# Altium footprint library 20Cnts-D.PcbLib: 1 footprints
Each footprint in its own frame and in the unit in brackets; x right, y up, seen from the top. Pads: shape width x height; smd on the part's side, far side on the other; paste and mask are expansions set on the pad; w line width, h text height; cw(c..) or ccw(c..) is an arc to the next point about the centre after c.
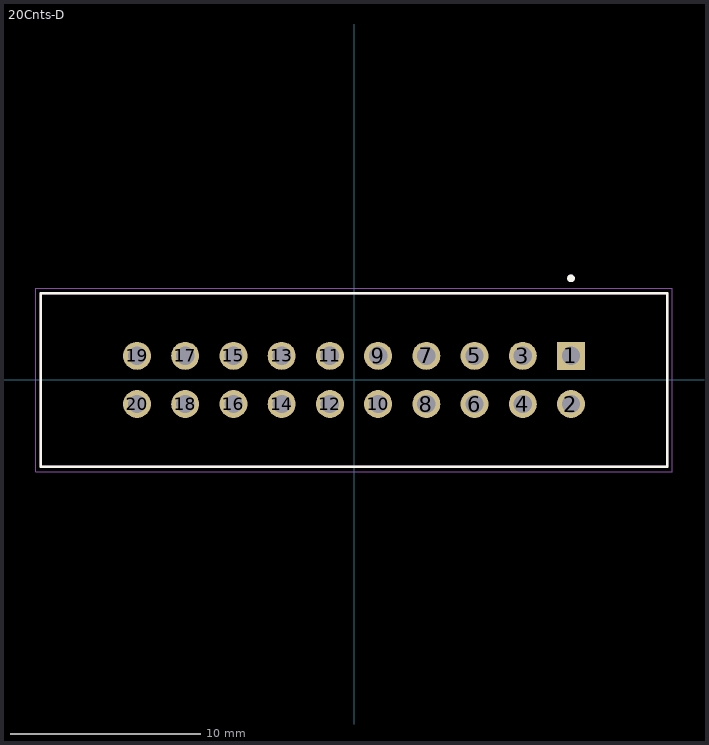
[diagram p0: the footprint, top view; thin cyan lines are the x and y axes]

## 20Cnts-D [mil]
pads (20):
  rect 58x58 hole 38: 1(450,50)
  round 58 hole 38: 2(450,-50) 3(350,50) 4(350,-50) 5(250,50) 6(250,-50) 7(150,50) 8(150,-50) 9(50,50) 10(50,-50) 11(-50,50) 12(-50,-50) 13(-150,50) 14(-150,-50) 15(-250,50) 16(-250,-50) 17(-350,50) 18(-350,-50) 19(-450,50) 20(-450,-50)
Top Overlay:
  circle w7.87: c450,210.63 r3.94
  lines w5: -650,-180 650,-180 650,180 -650,180 -650,-180
Mechanical 13:
  circle w7.87: c450,210.63 r3.94
  lines w5: -650,-180 650,-180 650,180 -650,180 -650,-180
Mechanical 15:
  lines w1.97: -659.84,-189.84 659.84,-189.84 659.84,189.84 -659.84,189.84 -659.84,-189.84
3D body "20Cnts-D.stp": height 389, standoff -119, extent -650,-180 650,180